# Altium footprint library Package_DFN_QFN.PcbLib: 735 footprints (part 8 of 46)
Each footprint in its own frame and in the unit in brackets; x right, y up, seen from the top. Pads: shape width x height; smd on the part's side, far side on the other; paste and mask are expansions set on the pad; w line width, h text height; cw(c..) or ccw(c..) is an arc to the next point about the centre after c.
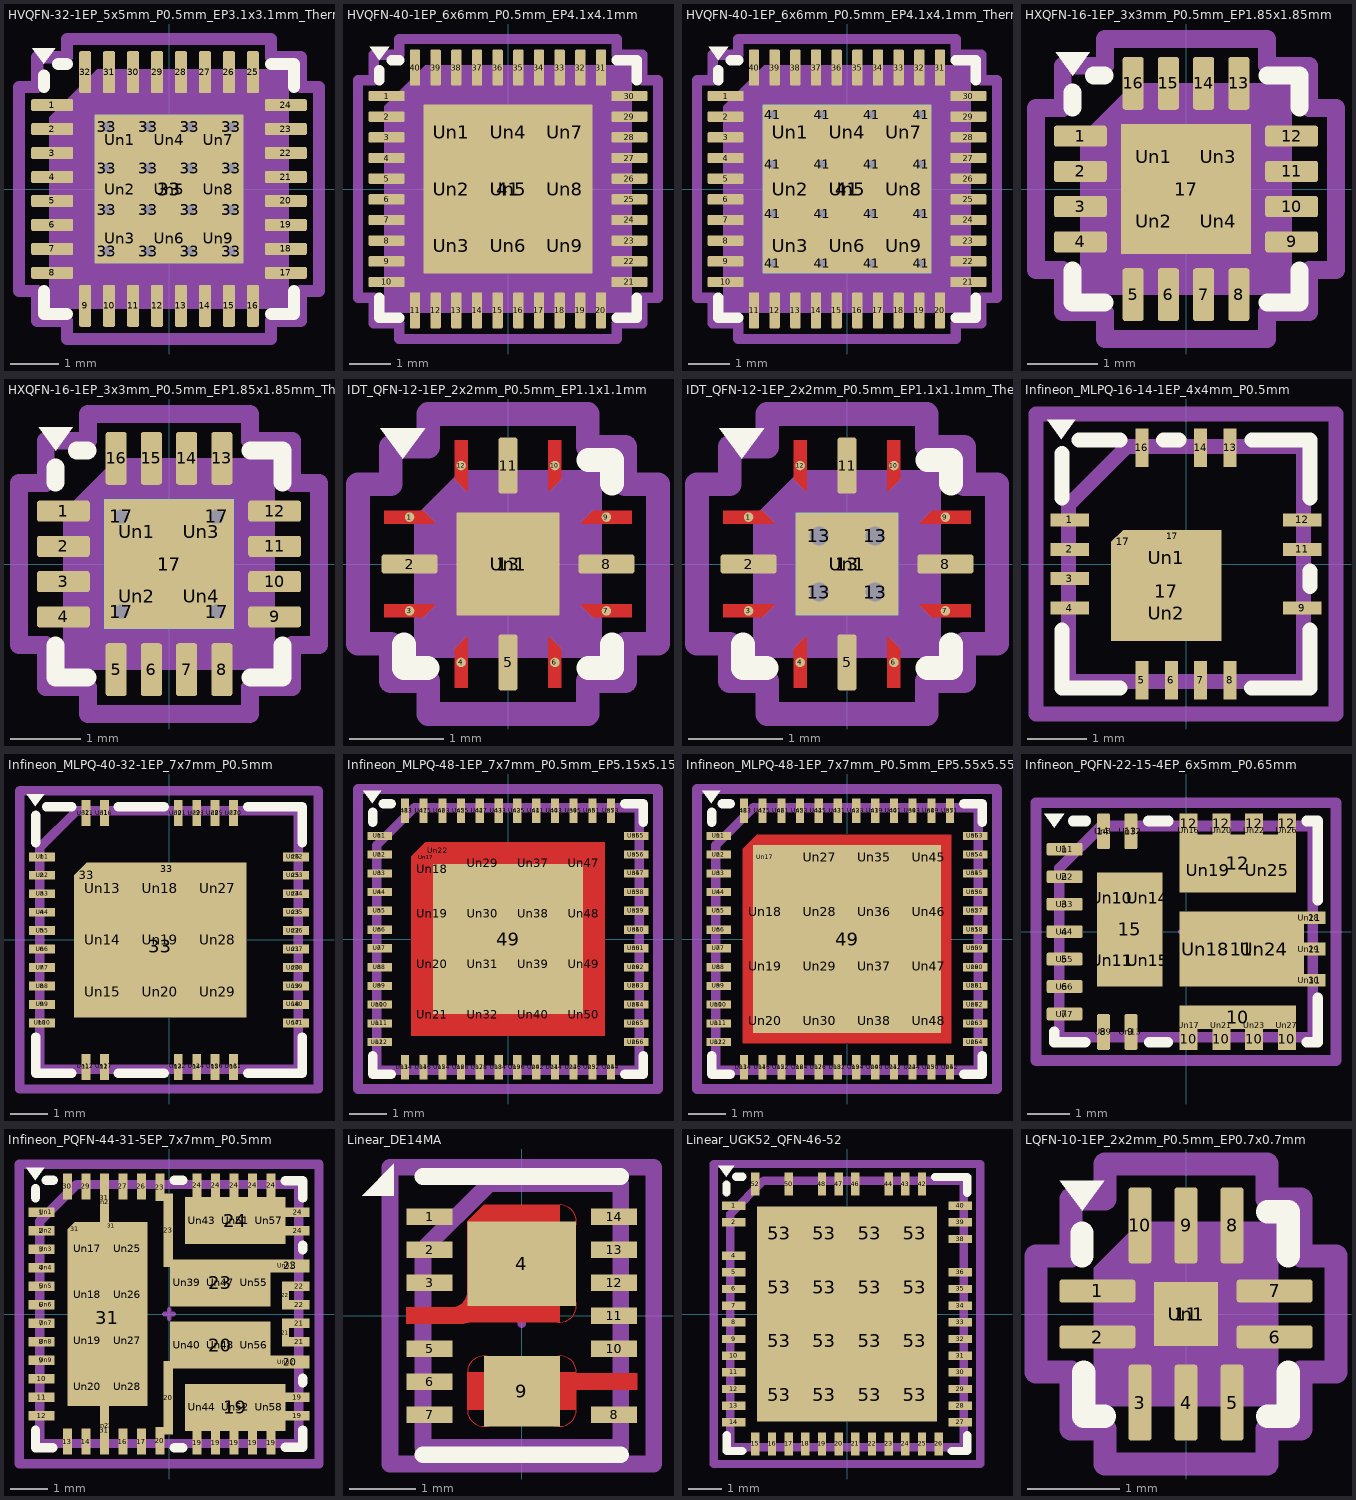
[diagram p7: the footprints below, top view; thin cyan lines are the x and y axes]

## HVQFN-32-1EP_5x5mm_P0.5mm_EP3.1x3.1mm_ThermalVias [mm] "HVQFN-32-1EP_5x5mm_P0.5mm_EP3.1x3.1mm_ThermalVias"
pads (59):
  rrect25% 0.875x0.25 smd: 1(-2.438,1.75) 2(-2.438,1.25) 3(-2.438,0.75) 4(-2.438,0.25) 5(-2.438,-0.25) 6(-2.438,-0.75) 7(-2.438,-1.25) 8(-2.438,-1.75) 17(2.438,-1.75) 18(2.438,-1.25) 19(2.438,-0.75) 20(2.438,-0.25) 21(2.438,0.25) 22(2.438,0.75) 23(2.438,1.25) 24(2.438,1.75)
  rrect25% 0.25x0.875 smd: 9(-1.75,-2.438) 10(-1.25,-2.438) 11(-0.75,-2.438) 12(-0.25,-2.438) 13(0.25,-2.438) 14(0.75,-2.438) 15(1.25,-2.438) 16(1.75,-2.438) 25(1.75,2.438) 26(1.25,2.438) 27(0.75,2.438) 28(0.25,2.438) 29(-0.25,2.438) 30(-0.75,2.438) 31(-1.25,2.438) 32(-1.75,2.438)
  round 0.5 hole 0.2: 33(-1.3,-1.3) 33(-1.3,-0.433) 33(-1.3,0.433) 33(-1.3,1.3) 33(-0.433,-1.3) 33(-0.433,-0.433) 33(-0.433,0.433) 33(-0.433,1.3) 33(0.433,-1.3) 33(0.433,-0.433) 33(0.433,0.433) 33(0.433,1.3) 33(1.3,-1.3) 33(1.3,-0.433) 33(1.3,0.433) 33(1.3,1.3)
  rect 3.1x3.1 smd: 33(0,0)
  rect 3.1x3.1 smd far side: 33(0,0)
  rrect25% 0.77x0.77 on Top Paste: Un1(-1.03,1.03) Un2(-1.03,0) Un3(-1.03,-1.03) Un4(0,1.03) Un5(0,0) Un6(0,-1.03) Un7(1.03,1.03) Un8(1.03,0) Un9(1.03,-1.03)
F.SilkS:
  region: -2.61,2.61 -2.85,2.94 -2.37,2.94
  lines w0.254: -2.61,-2.135 -2.61,-2.61 -2.135,-2.61 ; -2.61,2.135 -2.61,2.37 ; -2.31,2.61 -2.135,2.61 ; 2.135,-2.61 2.61,-2.61 2.61,-2.135 ; 2.135,2.61 2.61,2.61 2.61,2.135
Top Component Center:
  lines w0.127: -0.127,0 0.127,0 -0.127,0 ; 0,-0.127 0,0.127 0,-0.127
Top Assembly:
  region: 2.5,-2.5 -2.5,-2.5 -2.5,1.5 -1.5,2.5 2.5,2.5
Top Courtyard:
  lines w0.254: -3.13,-2.13 -3.13,2.13 -2.75,2.13 -2.75,2.75 -2.13,2.75 -2.13,3.13 2.13,3.13 2.13,2.75 2.75,2.75 2.75,2.13 3.13,2.13 3.13,-2.13 2.75,-2.13 2.75,-2.75 2.13,-2.75 2.13,-3.13 -2.13,-3.13 -2.13,-2.75 -2.75,-2.75 -2.75,-2.13 -3.13,-2.13
Top Designator:
  text ".Designator" at -3.43,-0.344 h1.52

## HVQFN-40-1EP_6x6mm_P0.5mm_EP4.1x4.1mm [mm] "HVQFN-40-1EP_6x6mm_P0.5mm_EP4.1x4.1mm"
pads (50):
  rrect25% 0.875x0.25 smd: 1(-2.937,2.25) 2(-2.937,1.75) 3(-2.937,1.25) 4(-2.937,0.75) 5(-2.937,0.25) 6(-2.937,-0.25) 7(-2.937,-0.75) 8(-2.937,-1.25) 9(-2.937,-1.75) 10(-2.937,-2.25) 21(2.937,-2.25) 22(2.937,-1.75) 23(2.937,-1.25) 24(2.937,-0.75) 25(2.937,-0.25) 26(2.937,0.25) 27(2.937,0.75) 28(2.937,1.25) 29(2.937,1.75) 30(2.937,2.25)
  rrect25% 0.25x0.875 smd: 11(-2.25,-2.937) 12(-1.75,-2.937) 13(-1.25,-2.937) 14(-0.75,-2.937) 15(-0.25,-2.937) 16(0.25,-2.937) 17(0.75,-2.937) 18(1.25,-2.937) 19(1.75,-2.937) 20(2.25,-2.937) 31(2.25,2.937) 32(1.75,2.937) 33(1.25,2.937) 34(0.75,2.937) 35(0.25,2.937) 36(-0.25,2.937) 37(-0.75,2.937) 38(-1.25,2.937) 39(-1.75,2.937) 40(-2.25,2.937)
  rect 4.1x4.1 smd: 41(0,0)
  rrect23% 1.1x1.1 on Top Paste: Un1(-1.37,1.37) Un2(-1.37,0) Un3(-1.37,-1.37) Un4(0,1.37) Un5(0,0) Un6(0,-1.37) Un7(1.37,1.37) Un8(1.37,0) Un9(1.37,-1.37)
F.SilkS:
  region: -3.11,3.11 -3.35,3.44 -2.87,3.44
  lines w0.254: -3.11,-2.635 -3.11,-3.11 -2.635,-3.11 ; -3.11,2.635 -3.11,2.87 ; -2.81,3.11 -2.635,3.11 ; 2.635,-3.11 3.11,-3.11 3.11,-2.635 ; 2.635,3.11 3.11,3.11 3.11,2.635
Top Component Center:
  lines w0.127: -0.127,0 0.127,0 -0.127,0 ; 0,-0.127 0,0.127 0,-0.127
Top Assembly:
  region: 3,-3 -3,-3 -3,2 -2,3 3,3
Top Courtyard:
  lines w0.254: -3.63,-2.63 -3.63,2.63 -3.25,2.63 -3.25,3.25 -2.63,3.25 -2.63,3.63 2.63,3.63 2.63,3.25 3.25,3.25 3.25,2.63 3.63,2.63 3.63,-2.63 3.25,-2.63 3.25,-3.25 2.63,-3.25 2.63,-3.63 -2.63,-3.63 -2.63,-3.25 -3.25,-3.25 -3.25,-2.63 -3.63,-2.63
Top Designator:
  text ".Designator" at -3.43,-0.344 h1.52

## HVQFN-40-1EP_6x6mm_P0.5mm_EP4.1x4.1mm_ThermalVias [mm] "HVQFN-40-1EP_6x6mm_P0.5mm_EP4.1x4.1mm_ThermalVias"
pads (67):
  rrect25% 0.875x0.25 smd: 1(-2.937,2.25) 2(-2.937,1.75) 3(-2.937,1.25) 4(-2.937,0.75) 5(-2.937,0.25) 6(-2.937,-0.25) 7(-2.937,-0.75) 8(-2.937,-1.25) 9(-2.937,-1.75) 10(-2.937,-2.25) 21(2.937,-2.25) 22(2.937,-1.75) 23(2.937,-1.25) 24(2.937,-0.75) 25(2.937,-0.25) 26(2.937,0.25) 27(2.937,0.75) 28(2.937,1.25) 29(2.937,1.75) 30(2.937,2.25)
  rrect25% 0.25x0.875 smd: 11(-2.25,-2.937) 12(-1.75,-2.937) 13(-1.25,-2.937) 14(-0.75,-2.937) 15(-0.25,-2.937) 16(0.25,-2.937) 17(0.75,-2.937) 18(1.25,-2.937) 19(1.75,-2.937) 20(2.25,-2.937) 31(2.25,2.937) 32(1.75,2.937) 33(1.25,2.937) 34(0.75,2.937) 35(0.25,2.937) 36(-0.25,2.937) 37(-0.75,2.937) 38(-1.25,2.937) 39(-1.75,2.937) 40(-2.25,2.937)
  round 0.5 hole 0.2: 41(-1.8,-1.8) 41(-1.8,-0.6) 41(-1.8,0.6) 41(-1.8,1.8) 41(-0.6,-1.8) 41(-0.6,-0.6) 41(-0.6,0.6) 41(-0.6,1.8) 41(0.6,-1.8) 41(0.6,-0.6) 41(0.6,0.6) 41(0.6,1.8) 41(1.8,-1.8) 41(1.8,-0.6) 41(1.8,0.6) 41(1.8,1.8)
  rect 4.1x4.1 smd: 41(0,0)
  rect 4.1x4.1 smd far side: 41(0,0)
  rrect24% 1.06x1.06 on Top Paste: Un1(-1.37,1.37) Un2(-1.37,0) Un3(-1.37,-1.37) Un4(0,1.37) Un5(0,0) Un6(0,-1.37) Un7(1.37,1.37) Un8(1.37,0) Un9(1.37,-1.37)
F.SilkS:
  region: -3.11,3.11 -3.35,3.44 -2.87,3.44
  lines w0.254: -3.11,-2.635 -3.11,-3.11 -2.635,-3.11 ; -3.11,2.635 -3.11,2.87 ; -2.81,3.11 -2.635,3.11 ; 2.635,-3.11 3.11,-3.11 3.11,-2.635 ; 2.635,3.11 3.11,3.11 3.11,2.635
Top Component Center:
  lines w0.127: -0.127,0 0.127,0 -0.127,0 ; 0,-0.127 0,0.127 0,-0.127
Top Assembly:
  region: 3,-3 -3,-3 -3,2 -2,3 3,3
Top Courtyard:
  lines w0.254: -3.63,-2.63 -3.25,-2.63 -3.25,-3.25 -2.63,-3.25 -2.63,-3.63 2.63,-3.63 2.63,-3.25 3.25,-3.25 3.25,-2.63 3.63,-2.63 3.63,2.63 3.25,2.63 3.25,3.25 2.63,3.25 2.63,3.63 -2.63,3.63 -2.63,3.25 -3.25,3.25 -3.25,2.63 -3.63,2.63 -3.63,-2.63
Top Designator:
  text ".Designator" at -3.43,-0.344 h1.52

## HXQFN-16-1EP_3x3mm_P0.5mm_EP1.85x1.85mm [mm] "HXQFN-16-1EP_3x3mm_P0.5mm_EP1.85x1.85mm"
pads (21):
  rrect25% 0.75x0.3 smd: 1(-1.5,0.75) 2(-1.5,0.25) 3(-1.5,-0.25) 4(-1.5,-0.75) 9(1.5,-0.75) 10(1.5,-0.25) 11(1.5,0.25) 12(1.5,0.75)
  rrect25% 0.3x0.75 smd: 5(-0.75,-1.5) 6(-0.25,-1.5) 7(0.25,-1.5) 8(0.75,-1.5) 13(0.75,1.5) 14(0.25,1.5) 15(-0.25,1.5) 16(-0.75,1.5)
  rect 1.85x1.85 smd: 17(0,0)
  rrect25% 0.75x0.75 on Top Paste: Un1(-0.46,0.46) Un2(-0.46,-0.46) Un3(0.46,0.46) Un4(0.46,-0.46)
F.SilkS:
  region: -1.61,1.61 -1.85,1.94 -1.37,1.94
  lines w0.254: -1.61,-1.16 -1.61,-1.61 -1.16,-1.61 ; -1.61,1.16 -1.61,1.37 ; -1.31,1.61 -1.16,1.61 ; 1.16,-1.61 1.61,-1.61 1.61,-1.16 ; 1.16,1.61 1.61,1.61 1.61,1.16
Top Component Center:
  lines w0.127: -0.127,0 0.127,0 -0.127,0 ; 0,-0.127 0,0.127 0,-0.127
Top Assembly:
  region: 1.5,-1.5 -1.5,-1.5 -1.5,0.75 -0.75,1.5 1.5,1.5
Top Courtyard:
  lines w0.254: -2.13,-1.15 -1.75,-1.15 -1.75,-1.75 -1.15,-1.75 -1.15,-2.13 1.15,-2.13 1.15,-1.75 1.75,-1.75 1.75,-1.15 2.13,-1.15 2.13,1.15 1.75,1.15 1.75,1.75 1.15,1.75 1.15,2.13 -1.15,2.13 -1.15,1.75 -1.75,1.75 -1.75,1.15 -2.13,1.15 -2.13,-1.15
Top Designator:
  text ".Designator" at -3.43,-0.344 h1.52
3D body "HXQFN-16-1EP_3x3mm_P0.5mm_EP1.85x1.85mm.step": height 0.5, standoff 0, extent -1.5,-1.5 1.5,1.5

## HXQFN-16-1EP_3x3mm_P0.5mm_EP1.85x1.85mm_ThermalVias [mm] "HXQFN-16-1EP_3x3mm_P0.5mm_EP1.85x1.85mm_ThermalVias"
pads (26):
  rrect25% 0.75x0.3 smd: 1(-1.5,0.75) 2(-1.5,0.25) 3(-1.5,-0.25) 4(-1.5,-0.75) 9(1.5,-0.75) 10(1.5,-0.25) 11(1.5,0.25) 12(1.5,0.75)
  rrect25% 0.3x0.75 smd: 5(-0.75,-1.5) 6(-0.25,-1.5) 7(0.25,-1.5) 8(0.75,-1.5) 13(0.75,1.5) 14(0.25,1.5) 15(-0.25,1.5) 16(-0.75,1.5)
  round 0.5 hole 0.2: 17(-0.675,-0.675) 17(-0.675,0.675) 17(0.675,-0.675) 17(0.675,0.675)
  rect 1.85x1.85 smd: 17(0,0)
  rect 1.85x1.85 smd far side: 17(0,0)
  rrect25% 0.75x0.75 on Top Paste: Un1(-0.46,0.46) Un2(-0.46,-0.46) Un3(0.46,0.46) Un4(0.46,-0.46)
F.SilkS:
  region: -1.61,1.61 -1.85,1.94 -1.37,1.94
  lines w0.254: -1.61,-1.16 -1.61,-1.61 -1.16,-1.61 ; -1.61,1.16 -1.61,1.37 ; -1.31,1.61 -1.16,1.61 ; 1.16,-1.61 1.61,-1.61 1.61,-1.16 ; 1.16,1.61 1.61,1.61 1.61,1.16
Top Component Center:
  lines w0.127: -0.127,0 0.127,0 -0.127,0 ; 0,-0.127 0,0.127 0,-0.127
Top Assembly:
  region: 1.5,-1.5 -1.5,-1.5 -1.5,0.75 -0.75,1.5 1.5,1.5
Top Courtyard:
  lines w0.254: -2.13,-1.15 -2.13,1.15 -1.75,1.15 -1.75,1.75 -1.15,1.75 -1.15,2.13 1.15,2.13 1.15,1.75 1.75,1.75 1.75,1.15 2.13,1.15 2.13,-1.15 1.75,-1.15 1.75,-1.75 1.15,-1.75 1.15,-2.13 -1.15,-2.13 -1.15,-1.75 -1.75,-1.75 -1.75,-1.15 -2.13,-1.15
Top Designator:
  text ".Designator" at -3.43,-0.344 h1.52
3D body "HXQFN-16-1EP_3x3mm_P0.5mm_EP1.85x1.85mm.step": height 0.5, standoff 0, extent -1.5,-1.5 1.5,1.5

## IDT_QFN-12-1EP_2x2mm_P0.5mm_EP1.1x1.1mm [mm] "IDT_QFN-12-1EP_2x2mm_P0.5mm_EP1.1x1.1mm"
pads (14):
  round 0.101 smd: 1(-1.05,0.5) 3(-1.05,-0.5) 4(-0.5,-1.05) 6(0.5,-1.05) 7(1.05,-0.5) 9(1.05,0.5) 10(0.5,1.05) 12(-0.5,1.05)
  rrect25% 0.6x0.2 smd: 2(-1.05,0) 8(1.05,0)
  rrect25% 0.2x0.6 smd: 5(0,-1.05) 11(0,1.05)
  rect 1.1x1.1 smd: 13(0,0)
  rrect25% 0.89x0.89 on Top Paste: Un1(0,0)
F.Cu:
  region: -0.78,0.448 -0.78,0.43 -1.32,0.43 -1.32,0.57 -0.902,0.57
  region: -0.78,-0.448 -0.902,-0.57 -1.32,-0.57 -1.32,-0.43 -0.78,-0.43
  region: -0.43,-1.32 -0.57,-1.32 -0.57,-0.902 -0.448,-0.78 -0.43,-0.78
  region: 0.57,-0.902 0.57,-1.32 0.43,-1.32 0.43,-0.78 0.448,-0.78
  region: 1.32,-0.57 0.902,-0.57 0.78,-0.448 0.78,-0.43 1.32,-0.43
  region: 1.32,0.43 0.78,0.43 0.78,0.448 0.902,0.57 1.32,0.57
  region: 0.57,0.902 0.448,0.78 0.43,0.78 0.43,1.32 0.57,1.32
  region: -0.43,0.78 -0.448,0.78 -0.57,0.902 -0.57,1.32 -0.43,1.32
F.SilkS:
  region: -1.12,1.12 -1.36,1.45 -0.88,1.45
  lines w0.254: -1.11,-0.86 -1.11,-1.11 -0.86,-1.11 ; 0.86,-1.11 1.11,-1.11 1.11,-0.86 ; 0.86,1.11 1.11,1.11 1.11,0.86
F.Paste:
  region: -0.78,0.448 -0.78,0.43 -1.32,0.43 -1.32,0.57 -0.902,0.57
  region: -0.78,-0.448 -0.902,-0.57 -1.32,-0.57 -1.32,-0.43 -0.78,-0.43
  region: -0.43,-1.32 -0.57,-1.32 -0.57,-0.902 -0.448,-0.78 -0.43,-0.78
  region: 0.57,-0.902 0.57,-1.32 0.43,-1.32 0.43,-0.78 0.448,-0.78
  region: 1.32,-0.57 0.902,-0.57 0.78,-0.448 0.78,-0.43 1.32,-0.43
  region: 1.32,0.43 0.78,0.43 0.78,0.448 0.902,0.57 1.32,0.57
  region: 0.57,0.902 0.448,0.78 0.43,0.78 0.43,1.32 0.57,1.32
  region: -0.43,0.78 -0.448,0.78 -0.57,0.902 -0.57,1.32 -0.43,1.32
F.Mask:
  region: -0.78,0.448 -0.78,0.43 -1.32,0.43 -1.32,0.57 -0.902,0.57
  region: -0.78,-0.448 -0.902,-0.57 -1.32,-0.57 -1.32,-0.43 -0.78,-0.43
  region: -0.43,-1.32 -0.57,-1.32 -0.57,-0.902 -0.448,-0.78 -0.43,-0.78
  region: 0.57,-0.902 0.57,-1.32 0.43,-1.32 0.43,-0.78 0.448,-0.78
  region: 1.32,-0.57 0.902,-0.57 0.78,-0.448 0.78,-0.43 1.32,-0.43
  region: 1.32,0.43 0.78,0.43 0.78,0.448 0.902,0.57 1.32,0.57
  region: 0.57,0.902 0.448,0.78 0.43,0.78 0.43,1.32 0.57,1.32
  region: -0.43,0.78 -0.448,0.78 -0.57,0.902 -0.57,1.32 -0.43,1.32
Top Component Center:
  lines w0.127: -0.127,0 0.127,0 -0.127,0 ; 0,-0.127 0,0.127 0,-0.127
Top Assembly:
  region: 1,-1 -1,-1 -1,0.5 -0.5,1 1,1
Top Courtyard:
  lines w0.254: -1.6,-0.85 -1.6,0.85 -1.25,0.85 -1.25,1.25 -0.85,1.25 -0.85,1.6 0.85,1.6 0.85,1.25 1.25,1.25 1.25,0.85 1.6,0.85 1.6,-0.85 1.25,-0.85 1.25,-1.25 0.85,-1.25 0.85,-1.6 -0.85,-1.6 -0.85,-1.25 -1.25,-1.25 -1.25,-0.85 -1.6,-0.85
Top Designator:
  text ".Designator" at -3.43,-0.344 h1.52

## IDT_QFN-12-1EP_2x2mm_P0.5mm_EP1.1x1.1mm_ThermalVias [mm] "IDT_QFN-12-1EP_2x2mm_P0.5mm_EP1.1x1.1mm_ThermalVias"
pads (19):
  round 0.101 smd: 1(-1.05,0.5) 3(-1.05,-0.5) 4(-0.5,-1.05) 6(0.5,-1.05) 7(1.05,-0.5) 9(1.05,0.5) 10(0.5,1.05) 12(-0.5,1.05)
  rrect25% 0.6x0.2 smd: 2(-1.05,0) 8(1.05,0)
  rrect25% 0.2x0.6 smd: 5(0,-1.05) 11(0,1.05)
  round 0.5 hole 0.2: 13(-0.3,-0.3) 13(-0.3,0.3) 13(0.3,-0.3) 13(0.3,0.3)
  rect 1.1x1.1 smd: 13(0,0)
  rect 1.1x1.1 smd far side: 13(0,0)
  rrect25% 0.92x0.92 on Top Paste: Un1(0,0)
F.Cu:
  region: -0.43,0.78 -0.448,0.78 -0.57,0.902 -0.57,1.32 -0.43,1.32
  region: 0.57,0.902 0.448,0.78 0.43,0.78 0.43,1.32 0.57,1.32
  region: 1.32,0.43 0.78,0.43 0.78,0.448 0.902,0.57 1.32,0.57
  region: 1.32,-0.57 0.902,-0.57 0.78,-0.448 0.78,-0.43 1.32,-0.43
  region: 0.57,-0.902 0.57,-1.32 0.43,-1.32 0.43,-0.78 0.448,-0.78
  region: -0.43,-1.32 -0.57,-1.32 -0.57,-0.902 -0.448,-0.78 -0.43,-0.78
  region: -0.78,-0.448 -0.902,-0.57 -1.32,-0.57 -1.32,-0.43 -0.78,-0.43
  region: -0.78,0.448 -0.78,0.43 -1.32,0.43 -1.32,0.57 -0.902,0.57
F.SilkS:
  region: -1.12,1.12 -1.36,1.45 -0.88,1.45
  lines w0.254: -1.11,-0.86 -1.11,-1.11 -0.86,-1.11 ; 0.86,-1.11 1.11,-1.11 1.11,-0.86 ; 0.86,1.11 1.11,1.11 1.11,0.86
F.Paste:
  region: -0.43,0.78 -0.448,0.78 -0.57,0.902 -0.57,1.32 -0.43,1.32
  region: 0.57,0.902 0.448,0.78 0.43,0.78 0.43,1.32 0.57,1.32
  region: 1.32,0.43 0.78,0.43 0.78,0.448 0.902,0.57 1.32,0.57
  region: 1.32,-0.57 0.902,-0.57 0.78,-0.448 0.78,-0.43 1.32,-0.43
  region: 0.57,-0.902 0.57,-1.32 0.43,-1.32 0.43,-0.78 0.448,-0.78
  region: -0.43,-1.32 -0.57,-1.32 -0.57,-0.902 -0.448,-0.78 -0.43,-0.78
  region: -0.78,-0.448 -0.902,-0.57 -1.32,-0.57 -1.32,-0.43 -0.78,-0.43
  region: -0.78,0.448 -0.78,0.43 -1.32,0.43 -1.32,0.57 -0.902,0.57
F.Mask:
  region: -0.43,0.78 -0.448,0.78 -0.57,0.902 -0.57,1.32 -0.43,1.32
  region: 0.57,0.902 0.448,0.78 0.43,0.78 0.43,1.32 0.57,1.32
  region: 1.32,0.43 0.78,0.43 0.78,0.448 0.902,0.57 1.32,0.57
  region: 1.32,-0.57 0.902,-0.57 0.78,-0.448 0.78,-0.43 1.32,-0.43
  region: 0.57,-0.902 0.57,-1.32 0.43,-1.32 0.43,-0.78 0.448,-0.78
  region: -0.43,-1.32 -0.57,-1.32 -0.57,-0.902 -0.448,-0.78 -0.43,-0.78
  region: -0.78,-0.448 -0.902,-0.57 -1.32,-0.57 -1.32,-0.43 -0.78,-0.43
  region: -0.78,0.448 -0.78,0.43 -1.32,0.43 -1.32,0.57 -0.902,0.57
Top Component Center:
  lines w0.127: -0.127,0 0.127,0 -0.127,0 ; 0,-0.127 0,0.127 0,-0.127
Top Assembly:
  region: 1,-1 -1,-1 -1,0.5 -0.5,1 1,1
Top Courtyard:
  lines w0.254: -1.6,-0.85 -1.25,-0.85 -1.25,-1.25 -0.85,-1.25 -0.85,-1.6 0.85,-1.6 0.85,-1.25 1.25,-1.25 1.25,-0.85 1.6,-0.85 1.6,0.85 1.25,0.85 1.25,1.25 0.85,1.25 0.85,1.6 -0.85,1.6 -0.85,1.25 -1.25,1.25 -1.25,0.85 -1.6,0.85 -1.6,-0.85
Top Designator:
  text ".Designator" at -2.251,-0.226 h1

## Infineon_MLPQ-16-14-1EP_4x4mm_P0.5mm [mm] "Infineon_MLPQ-16-14-1EP_4x4mm_P0.5mm"
pads (19):
  rect 0.65x0.22 smd: 1(-1.975,0.75) 2(-1.975,0.25) 3(-1.975,-0.25) 4(-1.975,-0.75) 9(1.975,-0.75) 11(1.975,0.25) 12(1.975,0.75)
  rect 0.22x0.65 smd: 5(-0.75,-1.975) 6(-0.25,-1.975) 7(0.25,-1.975) 8(0.75,-1.975) 13(0.75,1.975) 14(0.25,1.975) 16(-0.75,1.975)
  rect 0.283x0.283 smd rot 45: 17(-1.075,0.375)
  rect 1.88x1.68 smd: 17(-0.335,-0.465)
  rect 1.68x0.2 smd: 17(-0.235,0.475)
  rect 1.5x0.8 on Top Paste: Un1(-0.335,0.105) Un2(-0.335,-0.835)
F.SilkS:
  region: -2.12,2.12 -2.36,2.45 -1.88,2.45
  lines w0.254: -2.11,-1.12 -2.11,-2.11 -1.12,-2.11 ; -2.11,1.12 -2.11,1.88 ; -1.82,2.11 -1.12,2.11 ; -0.38,2.11 -0.12,2.11 ; 1.115,-2.11 2.105,-2.11 ; 1.12,2.11 2.11,2.11 2.11,1.12 ; 2.11,-2.1 2.11,-1.12 ; 2.11,-0.38 2.11,-0.12
Top Component Center:
  lines w0.127: -0.127,0 0.127,0 -0.127,0 ; 0,-0.127 0,0.127 0,-0.127
Top Assembly:
  lines w0.254: -2,-2 2,-2 2,2 -1,2 -2,1 -2,-2
Top Courtyard:
  lines w0.254: -2.55,-2.55 2.55,-2.55 2.55,2.55 -2.55,2.55 -2.55,-2.55
Top Designator:
  text ".Designator" at -3.43,-0.344 h1.52
3D body "Infineon_MLPQ-16-14-1EP_4x4mm_P0.5mm.step": height 0.78, standoff 0, extent -2,-2 2,2

## Infineon_MLPQ-40-32-1EP_7x7mm_P0.5mm [mm] "Infineon_MLPQ-40-32-1EP_7x7mm_P0.5mm"
pads (76):
  rect 0.7x0.24 smd: 1(-3.44,2.25) 2(-3.44,1.75) 3(-3.44,1.25) 4(-3.44,0.75) 5(-3.44,0.25) 6(-3.44,-0.25) 7(-3.44,-0.75) 8(-3.44,-1.25) 9(-3.44,-1.75) 10(-3.44,-2.25) 17(3.44,-2.25) 18(3.44,-1.75) 19(3.44,-1.25) 20(3.44,-0.75) 21(3.44,-0.25) 22(3.44,0.25) 23(3.44,0.75) 24(3.44,1.25) 25(3.44,1.75) 26(3.44,2.25)
  rect 0.24x0.7 smd: 11(-2.25,-3.44) 12(-1.75,-3.44) 13(0.25,-3.44) 14(0.75,-3.44) 15(1.25,-3.44) 16(1.75,-3.44) 27(1.75,3.44) 28(1.25,3.44) 29(0.75,3.44) 30(0.25,3.44) 31(-1.75,3.44) 32(-2.25,3.44)
  rect 0.495x0.495 smd rot 45: 33(-2.225,1.75)
  rect 4.675x3.85 smd: 33(-0.238,-0.175)
  rect 4.325x0.35 smd: 33(-0.062,1.925)
  rect 0.65x0.22 on Top Paste: Un1(-3.425,2.25) Un2(-3.425,1.75) Un3(-3.425,1.25) Un4(-3.425,0.75) Un5(-3.425,0.25) Un6(-3.425,-0.25) Un7(-3.425,-0.75) Un8(-3.425,-1.25) Un9(-3.425,-1.75) Un10(-3.425,-2.25) Un32(3.425,2.25) Un33(3.425,1.75) Un34(3.425,1.25) Un35(3.425,0.75) Un36(3.425,0.25) Un37(3.425,-0.25) Un38(3.425,-0.75) Un39(3.425,-1.25) Un40(3.425,-1.75) Un41(3.425,-2.25)
  rect 0.22x0.65 on Top Paste: Un11(-2.25,3.425) Un12(-2.25,-3.425) Un16(-1.75,3.425) Un17(-1.75,-3.425) Un21(0.25,3.425) Un22(0.25,-3.425) Un23(0.75,3.425) Un24(0.75,-3.425) Un25(1.25,3.425) Un26(1.25,-3.425) Un30(1.75,3.425) Un31(1.75,-3.425)
  rect 1.2x1.1 on Top Paste: Un13(-1.796,1.4) Un14(-1.796,0) Un15(-1.796,-1.4) Un18(-0.238,1.4) Un19(-0.238,0) Un20(-0.238,-1.4) Un27(1.321,1.4) Un28(1.321,0) Un29(1.321,-1.4)
F.SilkS:
  region: -3.62,3.62 -3.86,3.95 -3.38,3.95
  lines w0.254: -3.61,-2.63 -3.61,-3.61 -2.63,-3.61 ; -3.61,2.63 -3.61,3.38 ; -3.32,3.61 -2.63,3.61 ; -1.37,-3.61 -0.13,-3.61 ; -1.37,3.61 -0.13,3.61 ; 2.13,-3.61 3.61,-3.61 3.61,-2.63 ; 2.13,3.61 3.61,3.61 3.61,2.63
Top Component Center:
  lines w0.127: -0.127,0 0.127,0 -0.127,0 ; 0,-0.127 0,0.127 0,-0.127
Top Assembly:
  lines w0.254: -3.5,-3.5 -3.5,2.5 -2.5,3.5 3.5,3.5 3.5,-3.5 -3.5,-3.5
Top Courtyard:
  lines w0.254: -4.04,-4.04 -4.04,4.04 4.04,4.04 4.04,-4.04 -4.04,-4.04
Top Designator:
  text ".Designator" at -3.43,-0.344 h1.52

## Infineon_MLPQ-48-1EP_7x7mm_P0.5mm_EP5.15x5.15mm [mm] "Infineon_MLPQ-48-1EP_7x7mm_P0.5mm_EP5.15x5.15mm"
pads (115):
  rect 0.65x0.22 smd: 1(-3.425,2.75) 2(-3.425,2.25) 3(-3.425,1.75) 4(-3.425,1.25) 5(-3.425,0.75) 6(-3.425,0.25) 7(-3.425,-0.25) 8(-3.425,-0.75) 9(-3.425,-1.25) 10(-3.425,-1.75) 11(-3.425,-2.25) 12(-3.425,-2.75) 25(3.425,-2.75) 26(3.425,-2.25) 27(3.425,-1.75) 28(3.425,-1.25) 29(3.425,-0.75) 30(3.425,-0.25) 31(3.425,0.25) 32(3.425,0.75) 33(3.425,1.25) 34(3.425,1.75) 35(3.425,2.25) 36(3.425,2.75)
  rect 0.22x0.65 smd: 13(-2.75,-3.425) 14(-2.25,-3.425) 15(-1.75,-3.425) 16(-1.25,-3.425) 17(-0.75,-3.425) 18(-0.25,-3.425) 19(0.25,-3.425) 20(0.75,-3.425) 21(1.25,-3.425) 22(1.75,-3.425) 23(2.25,-3.425) 24(2.75,-3.425) 37(2.75,3.425) 38(2.25,3.425) 39(1.75,3.425) 40(1.25,3.425) 41(0.75,3.425) 42(0.25,3.425) 43(-0.25,3.425) 44(-0.75,3.425) 45(-1.25,3.425) 46(-1.75,3.425) 47(-2.25,3.425) 48(-2.75,3.425)
  rect 4x4 smd: 49(0,0)
  rect 0.55x0.22 on Top Paste: Un1(-3.425,2.75) Un2(-3.425,2.25) Un3(-3.425,1.75) Un4(-3.425,1.25) Un5(-3.425,0.75) Un6(-3.425,0.25) Un7(-3.425,-0.25) Un8(-3.425,-0.75) Un9(-3.425,-1.25) Un10(-3.425,-1.75) Un11(-3.425,-2.25) Un12(-3.425,-2.75) Un55(3.425,2.75) Un56(3.425,2.25) Un57(3.425,1.75) Un58(3.425,1.25) Un59(3.425,0.75) Un60(3.425,0.25) Un61(3.425,-0.25) Un62(3.425,-0.75) Un63(3.425,-1.25) Un64(3.425,-1.75) Un65(3.425,-2.25) Un66(3.425,-2.75)
  rect 0.22x0.55 on Top Paste: Un13(-2.75,3.425) Un14(-2.75,-3.425) Un15(-2.25,3.425) Un16(-2.25,-3.425) Un23(-1.75,3.425) Un24(-1.75,-3.425) Un25(-1.25,3.425) Un26(-1.25,-3.425) Un27(-0.75,3.425) Un28(-0.75,-3.425) Un33(-0.25,3.425) Un34(-0.25,-3.425) Un35(0.25,3.425) Un36(0.25,-3.425) Un41(0.75,3.425) Un42(0.75,-3.425) Un43(1.25,3.425) Un44(1.25,-3.425) Un45(1.75,3.425) Un46(1.75,-3.425) Un51(2.25,3.425) Un52(2.25,-3.425) Un53(2.75,3.425) Un54(2.75,-3.425)
  rect 0.479x0.479 on Top Paste rot 45: Un17(-2.186,2.186)
  rect 1x0.661 on Top Paste: Un18(-2.025,1.856)
  rect 1x1 on Top Paste: Un19(-2.025,0.675) Un20(-2.025,-0.675) Un21(-2.025,-2.025) Un29(-0.675,2.025) Un30(-0.675,0.675) Un31(-0.675,-0.675) Un32(-0.675,-2.025) Un37(0.675,2.025) Un38(0.675,0.675) Un39(0.675,-0.675) Un40(0.675,-2.025) Un47(2.025,2.025) Un48(2.025,0.675) Un49(2.025,-0.675) Un50(2.025,-2.025)
  rect 0.661x0.339 on Top Paste: Un22(-1.856,2.355)
F.Cu:
  region: 2.575,-2.575 -2.575,-2.575 -2.575,2.207 -2.207,2.575 2.575,2.575
F.SilkS:
  region: -3.62,3.62 -3.86,3.95 -3.38,3.95
  lines w0.254: -3.61,-3.12 -3.61,-3.61 -3.12,-3.61 ; -3.61,3.12 -3.61,3.38 ; -3.32,3.61 -3.12,3.61 ; 3.115,3.61 3.605,3.61 3.605,3.12 ; 3.12,-3.605 3.61,-3.605 3.61,-3.12
F.Mask:
  region: 2.575,-2.575 -2.575,-2.575 -2.575,2.207 -2.207,2.575 2.575,2.575
Top Component Center:
  lines w0.127: -0.127,0 0.127,0 -0.127,0 ; 0,-0.127 0,0.127 0,-0.127
Top Assembly:
  lines w0.254: -3.5,-3.5 -3.5,2.5 -2.5,3.5 3.5,3.5 3.5,-3.5 -3.5,-3.5
Top Courtyard:
  lines w0.254: -4,-4 -4,4 4,4 4,-4 -4,-4
Top Designator:
  text ".Designator" at -3.465,-0.344 h1.52

## Infineon_MLPQ-48-1EP_7x7mm_P0.5mm_EP5.55x5.55mm [mm] "Infineon_MLPQ-48-1EP_7x7mm_P0.5mm_EP5.55x5.55mm"
pads (113):
  rect 0.65x0.22 smd: 1(-3.425,2.75) 2(-3.425,2.25) 3(-3.425,1.75) 4(-3.425,1.25) 5(-3.425,0.75) 6(-3.425,0.25) 7(-3.425,-0.25) 8(-3.425,-0.75) 9(-3.425,-1.25) 10(-3.425,-1.75) 11(-3.425,-2.25) 12(-3.425,-2.75) 25(3.425,-2.75) 26(3.425,-2.25) 27(3.425,-1.75) 28(3.425,-1.25) 29(3.425,-0.75) 30(3.425,-0.25) 31(3.425,0.25) 32(3.425,0.75) 33(3.425,1.25) 34(3.425,1.75) 35(3.425,2.25) 36(3.425,2.75)
  rect 0.22x0.65 smd: 13(-2.75,-3.425) 14(-2.25,-3.425) 15(-1.75,-3.425) 16(-1.25,-3.425) 17(-0.75,-3.425) 18(-0.25,-3.425) 19(0.25,-3.425) 20(0.75,-3.425) 21(1.25,-3.425) 22(1.75,-3.425) 23(2.25,-3.425) 24(2.75,-3.425) 37(2.75,3.425) 38(2.25,3.425) 39(1.75,3.425) 40(1.25,3.425) 41(0.75,3.425) 42(0.25,3.425) 43(-0.25,3.425) 44(-0.75,3.425) 45(-1.25,3.425) 46(-1.75,3.425) 47(-2.25,3.425) 48(-2.75,3.425)
  rect 5x5 smd: 49(0,0)
  rect 0.55x0.22 on Top Paste: Un1(-3.425,2.75) Un2(-3.425,2.25) Un3(-3.425,1.75) Un4(-3.425,1.25) Un5(-3.425,0.75) Un6(-3.425,0.25) Un7(-3.425,-0.25) Un8(-3.425,-0.75) Un9(-3.425,-1.25) Un10(-3.425,-1.75) Un11(-3.425,-2.25) Un12(-3.425,-2.75) Un53(3.425,2.75) Un54(3.425,2.25) Un55(3.425,1.75) Un56(3.425,1.25) Un57(3.425,0.75) Un58(3.425,0.25) Un59(3.425,-0.25) Un60(3.425,-0.75) Un61(3.425,-1.25) Un62(3.425,-1.75) Un63(3.425,-2.25) Un64(3.425,-2.75)
  rect 0.22x0.55 on Top Paste: Un13(-2.75,3.425) Un14(-2.75,-3.425) Un15(-2.25,3.425) Un16(-2.25,-3.425) Un21(-1.75,3.425) Un22(-1.75,-3.425) Un23(-1.25,3.425) Un24(-1.25,-3.425) Un25(-0.75,3.425) Un26(-0.75,-3.425) Un31(-0.25,3.425) Un32(-0.25,-3.425) Un33(0.25,3.425) Un34(0.25,-3.425) Un39(0.75,3.425) Un40(0.75,-3.425) Un41(1.25,3.425) Un42(1.25,-3.425) Un43(1.75,3.425) Un44(1.75,-3.425) Un49(2.25,3.425) Un50(2.25,-3.425) Un51(2.75,3.425) Un52(2.75,-3.425)
  rect 0.5x0.5 on Top Paste: Un17(-2.175,2.175)
  rect 1.1x1.1 on Top Paste: Un18(-2.175,0.725) Un19(-2.175,-0.725) Un20(-2.175,-2.175) Un27(-0.725,2.175) Un28(-0.725,0.725) Un29(-0.725,-0.725) Un30(-0.725,-2.175) Un35(0.725,2.175) Un36(0.725,0.725) Un37(0.725,-0.725) Un38(0.725,-2.175) Un45(2.175,2.175) Un46(2.175,0.725) Un47(2.175,-0.725) Un48(2.175,-2.175)
F.Cu:
  region: 2.775,-2.775 -2.775,-2.775 -2.775,2.407 -2.407,2.775 2.775,2.775
F.SilkS:
  region: -3.62,3.62 -3.86,3.95 -3.38,3.95
  lines w0.254: -3.61,-3.12 -3.61,-3.61 -3.12,-3.61 ; -3.61,3.12 -3.61,3.38 ; -3.32,3.61 -3.12,3.61 ; 3.12,-3.61 3.61,-3.61 3.61,-3.12 ; 3.12,3.61 3.61,3.61 3.61,3.12
F.Paste:
  region: -1.625,1.625 -2.725,1.625 -2.725,2.386 -2.386,2.725 -1.625,2.725
F.Mask:
  region: 2.775,-2.775 -2.775,-2.775 -2.775,2.407 -2.407,2.775 2.775,2.775
Top Component Center:
  lines w0.127: -0.127,0 0.127,0 -0.127,0 ; 0,-0.127 0,0.127 0,-0.127
Top Assembly:
  lines w0.254: -3.5,-3.5 3.5,-3.5 3.5,3.5 -2.5,3.5 -3.5,2.5 -3.5,-3.5
Top Courtyard:
  lines w0.254: -4,-4 4,-4 4,4 -4,4 -4,-4
Top Designator:
  text ".Designator" at -3.465,-0.344 h1.52

## Infineon_PQFN-22-15-4EP_6x5mm_P0.65mm [mm] "Infineon_PQFN-22-15-4EP_6x5mm_P0.65mm"
pads (56):
  rrect25% 0.85x0.3 smd: 1(-2.873,1.95) 2(-2.873,1.3) 3(-2.873,0.65) 4(-2.873,0) 5(-2.873,-0.65) 6(-2.873,-1.3) 7(-2.873,-1.95)
  rrect25% 0.3x0.85 smd: 8(-1.953,-2.375) 9(-1.302,-2.375) 13(-1.302,2.375) 14(-1.953,2.375)
  rect 0.425x0.5 smd: 10(0.062,-2.55) 10(0.837,-2.55) 10(1.613,-2.55) 10(2.388,-2.55) 12(0.061,2.55) 12(0.835,2.55) 12(1.61,2.55) 12(2.385,2.55)
  rect 2.75x0.55 smd: 10(1.225,-2.025)
  rect 2.95x1.775 smd: 11(1.322,-0.413)
  rect 0.5x0.299 smd: 11(3.047,-1.15) 11(3.047,0.325)
  rect 0.5x0.3 smd: 11(3.047,-0.413)
  rect 2.75x1.375 smd: 12(1.223,1.613)
  rect 1.55x2.7 smd: 15(-1.331,0.05)
  rrect25% 0.8x0.27 on Top Paste: Un1(-2.873,1.95) Un2(-2.873,1.3) Un3(-2.873,0.65) Un4(-2.873,0) Un5(-2.873,-0.65) Un6(-2.873,-1.3) Un7(-2.873,-1.95)
  rrect25% 0.27x0.8 on Top Paste: Un8(-1.953,2.37) Un9(-1.953,-2.37) Un12(-1.302,2.37) Un13(-1.302,-2.37)
  rrect25% 0.7x1.22 on Top Paste: Un10(-1.753,0.795) Un11(-1.753,-0.695) Un14(-0.903,0.795) Un15(-0.903,-0.695)
  rrect25% 0.425x0.625 on Top Paste: Un16(0.061,2.4) Un17(0.062,-2.221) Un20(0.835,2.4) Un21(0.837,-2.221) Un22(1.61,2.4) Un23(1.613,-2.221) Un26(2.385,2.4) Un27(2.388,-2.221)
  rrect25% 1.24x1.78 on Top Paste: Un18(0.467,-0.413) Un24(1.847,-0.413)
  rrect25% 1.25x0.96 on Top Paste: Un19(0.527,1.45) Un25(1.927,1.45)
  rrect25% 0.625x0.29 on Top Paste: Un28(2.907,0.327) Un29(2.907,-0.413) Un30(2.907,-1.152)
F.SilkS:
  region: -3.12,2.46 -3.36,2.79 -2.88,2.79
  lines w0.254: -3.12,-2.37 -3.12,-2.62 -2.39,-2.62 ; -2.67,2.62 -2.37,2.62 ; -0.89,2.62 -0.42,2.62 ; -0.87,-2.62 -0.43,-2.62 ; 2.86,-2.62 3.12,-2.62 3.12,-1.57 ; 2.86,2.62 3.12,2.62 3.12,0.74
Top Component Center:
  lines w0.127: -0.127,0 0.127,0 -0.127,0 ; 0,-0.127 0,0.127 0,-0.127
Top Assembly:
  lines w0.254: -3,-2.5 3,-2.5 3,2.5 -2,2.5 -3,1.5 -3,-2.5
Top Courtyard:
  lines w0.254: -3.55,-3.05 3.55,-3.05 3.55,3.05 -3.55,3.05 -3.55,-3.05
Top Designator:
  text ".Designator" at -3.43,-0.344 h1.52

## Infineon_PQFN-44-31-5EP_7x7mm_P0.5mm [mm] "Infineon_PQFN-44-31-5EP_7x7mm_P0.5mm"
pads (125):
  rect 0.7x0.25 smd: 1(-3.447,2.75) 2(-3.447,2.25) 3(-3.447,1.75) 4(-3.447,1.25) 5(-3.447,0.75) 6(-3.447,0.25) 7(-3.447,-0.25) 8(-3.447,-0.75) 9(-3.447,-1.25) 10(-3.447,-1.75) 11(-3.447,-2.25) 12(-3.447,-2.75)
  rect 0.25x0.7 smd: 13(-2.746,-3.45) 14(-2.247,-3.45) 16(-1.246,-3.45) 17(-0.747,-3.45) 26(-0.747,3.45) 27(-1.246,3.45) 29(-2.247,3.45) 30(-2.746,3.45)
  rect 0.25x0.645 smd: 19(0.754,-3.477) 19(1.254,-3.477) 19(1.753,-3.477) 19(2.254,-3.477) 19(2.753,-3.477) 24(0.754,3.477) 24(1.254,3.477) 24(1.753,3.477) 24(2.254,3.477) 24(2.753,3.477)
  rect 2.72x1.27 smd: 19(1.783,-2.52) 20(1.383,-0.84) 23(1.383,0.84) 24(1.786,2.52)
  rect 0.65x0.25 smd: 19(3.468,-2.75) 19(3.468,-2.25) 24(3.471,2.25) 24(3.471,2.75)
  rect 0.25x0.75 smd: 20(-0.246,-3.425) 23(-0.246,3.425)
  rect 0.25x1.98 smd: 20(-0.026,-2.26) 23(-0.026,2.26)
  rect 1.05x0.35 smd: 20(3.268,-1.3) 23(3.268,1.3)
  rect 0.2x0.75 smd: 21(3.143,-0.5) 22(3.143,0.5)
  rect 0.55x0.25 smd: 21(3.518,-0.75) 21(3.518,-0.25) 22(3.518,0.25) 22(3.518,0.75)
  rect 0.283x0.283 smd rot 45: 31(-2.546,2.29)
  rect 0.25x1.31 smd: 31(-1.746,-3.145) 31(-1.746,3.145)
  rect 2.16x4.78 smd: 31(-1.666,-0.1)
  rect 1.96x0.2 smd: 31(-1.566,2.39)
  rect 0.39x0.22 on Top Paste: Un1(-3.321,2.75) Un2(-3.321,2.25) Un3(-3.321,1.75) Un4(-3.321,1.25) Un5(-3.321,0.75) Un6(-3.321,0.25) Un7(-3.321,-0.25) Un8(-3.321,-0.75) Un9(-3.321,-1.25) Un10(-3.321,-1.75) Un11(-3.321,-2.25) Un12(-3.321,-2.75)
  rect 0.22x0.39 on Top Paste: Un13(-2.746,3.325) Un14(-2.746,-3.325) Un15(-2.247,3.325) Un16(-2.247,-3.325) Un23(-1.246,3.325) Un24(-1.246,-3.325) Un29(-0.747,3.325) Un30(-0.747,-3.325)
  rect 0.77x0.93 on Top Solder: Un17(-2.207,1.76) Un18(-2.207,0.52) Un19(-2.207,-0.72) Un20(-2.207,-1.96) Un25(-1.127,1.76) Un26(-1.127,0.52) Un27(-1.127,-0.72) Un28(-1.127,-1.96)
  rect 0.23x1.01 on Top Paste: Un21(-1.746,3.015) Un22(-1.746,-3.015)
  rect 0.23x0.44 on Top Paste: Un31(-0.246,3.28) Un32(-0.246,-3.28)
  rect 0.21x0.34 on Top Paste: Un33(-0.026,3.07) Un34(-0.026,2.37) Un35(-0.026,1.67) Un36(-0.026,-1.67) Un37(-0.026,-2.37) Un38(-0.026,-3.07)
  rect 0.68x0.9 on Top Solder: Un39(0.473,0.84) Un40(0.473,-0.84) Un47(1.383,0.84) Un48(1.383,-0.84) Un55(2.294,0.84) Un56(2.294,-0.84)
  rect 0.22x0.35 on Top Solder: Un41(0.754,3.325) Un42(0.754,-3.325) Un45(1.254,3.325) Un46(1.254,-3.325) Un49(1.753,3.325) Un50(1.753,-3.325) Un53(2.254,3.325) Un54(2.254,-3.325) Un59(2.753,3.325) Un60(2.753,-3.325)
  rect 0.65x0.9 on Top Solder: Un43(0.877,2.515) Un44(0.877,-2.515) Un51(1.786,2.515) Un52(1.786,-2.515) Un57(2.696,2.515) Un58(2.696,-2.515)
  rect 0.68x0.22 on Top Solder: Un61(3.163,1.3) Un62(3.163,-1.3)
  rect 0.44x0.22 on Top Solder: Un63(3.284,0.75) Un64(3.284,0.25) Un65(3.284,-0.25) Un66(3.284,-0.75)
  rect 0.28x0.22 on Top Solder: Un67(3.364,2.75) Un68(3.364,2.25) Un69(3.364,-2.25) Un70(3.364,-2.75)
F.SilkS:
  region: -3.62,3.62 -3.86,3.95 -3.38,3.95
  lines w0.254: -3.61,-3.14 -3.61,-3.61 -3.14,-3.61 ; -3.61,3.14 -3.61,3.38 ; -3.32,3.61 -3.13,3.61 ; 0.14,-3.61 0.37,-3.61 ; 0.14,3.61 0.37,3.61 ; 3.14,-3.605 3.61,-3.605 3.61,-3.135 ; 3.14,3.605 3.61,3.605 3.61,3.135 ; 3.61,-1.86 3.61,-1.74 ; 3.61,1.74 3.61,1.86
Top Component Center:
  lines w0.127: -0.127,0 0.127,0 -0.127,0 ; 0,-0.127 0,0.127 0,-0.127
Top Assembly:
  lines w0.254: -3.5,-3.5 -3.5,2.5 -2.5,3.5 3.5,3.5 3.5,-3.5 -3.5,-3.5
Top Courtyard:
  lines w0.254: -4.05,-4.05 -4.05,4.05 4.05,4.05 4.05,-4.05 -4.05,-4.05
Top Designator:
  text ".Designator" at -3.43,-0.344 h1.52

## Linear_DE14MA [mm] "Linear_DE14MA"
pads (14):
  rect 0.7x0.25 smd: 1(-1.4,1.5) 2(-1.4,1) 3(-1.4,0.5) 5(-1.4,-0.5) 6(-1.4,-1) 7(-1.4,-1.5) 8(1.4,-1.5) 10(1.4,-0.5) 11(1.4,0) 12(1.4,0.5) 13(1.4,1) 14(1.4,1.5)
  rect 1.65x1.28 smd: 4(0,0.79)
  rect 1.15x1.07 smd: 9(0,-1.145)
F.Cu:
  circle w0: c0.575,1.43 r0.25
  circle w0: c0.575,0.15 r0.25
  circle w0: c-0.575,-0.86 r0.25
  circle w0: c0.575,-0.86 r0.25
  circle w0: c-0.575,-1.43 r0.25
  circle w0: c0.575,-1.43 r0.25
  region: 0.575,-0.1 -0.825,-0.1 -0.825,1.43 -0.575,1.68 0.575,1.68
  region: -0.78,-0.1 -0.88,-0.125 -1.75,-0.125 -1.75,0.125 -0.78,0.125
  region: -0.825,0.125 -1.075,0.125 -1.025,0.13 -0.977,0.145 -0.935,0.168 -0.897,0.199 -0.866,0.238 -0.844,0.279 -0.83,0.326 -0.825,0.375
  region: 0.825,-1.43 -0.825,-1.43 -0.825,-0.86 0.825,-0.86
  region: 1.75,-1.125 0.825,-1.125 0.825,-0.875 1.75,-0.875
F.SilkS:
  region: -1.94,1.82 -2.42,1.82 -1.94,2.3
  lines w0.254: -1.5,-2.11 1.5,-2.11 ; -1.5,2.11 1.5,2.11
F.Paste:
  circle w0: c0.575,1.43 r0.25
  circle w0: c0.575,0.15 r0.25
  circle w0: c-0.575,-0.86 r0.25
  circle w0: c0.575,-0.86 r0.25
  circle w0: c-0.575,-1.43 r0.25
  circle w0: c0.575,-1.43 r0.25
  region: 0.575,-0.1 -0.825,-0.1 -0.825,1.43 -0.575,1.68 0.575,1.68
  region: -0.78,-0.1 -0.88,-0.125 -1.75,-0.125 -1.75,0.125 -0.78,0.125
  region: -0.825,0.125 -1.075,0.125 -1.025,0.13 -0.977,0.145 -0.935,0.168 -0.897,0.199 -0.866,0.238 -0.844,0.279 -0.83,0.326 -0.825,0.375
  region: 0.825,-1.43 -0.825,-1.43 -0.825,-0.86 0.825,-0.86
  region: 1.75,-1.125 0.825,-1.125 0.825,-0.875 1.75,-0.875
F.Mask:
  circle w0: c0.575,1.43 r0.25
  circle w0: c0.575,0.15 r0.25
  circle w0: c-0.575,-0.86 r0.25
  circle w0: c0.575,-0.86 r0.25
  circle w0: c-0.575,-1.43 r0.25
  circle w0: c0.575,-1.43 r0.25
  region: 0.575,-0.1 -0.825,-0.1 -0.825,1.43 -0.575,1.68 0.575,1.68
  region: -0.78,-0.1 -0.88,-0.125 -1.75,-0.125 -1.75,0.125 -0.78,0.125
  region: -0.825,0.125 -1.075,0.125 -1.025,0.13 -0.977,0.145 -0.935,0.168 -0.897,0.199 -0.866,0.238 -0.844,0.279 -0.83,0.326 -0.825,0.375
  region: 0.825,-1.43 -0.825,-1.43 -0.825,-0.86 0.825,-0.86
  region: 1.75,-1.125 0.825,-1.125 0.825,-0.875 1.75,-0.875
Top Component Center:
  lines w0.127: -0.127,0 0.127,0 -0.127,0 ; 0,-0.127 0,0.127 0,-0.127
Top Assembly:
  lines w0.254: -1.5,-2 -1.5,1 -0.5,2 1.5,2 1.5,-2 -1.5,-2
Top Courtyard:
  lines w0.254: -2,-2.25 -2,2.25 2,2.25 2,-2.25 -2,-2.25
Top Designator:
  text ".Designator" at -3.43,-0.344 h1.52

## Linear_UGK52_QFN-46-52 [mm] "Linear_UGK52_QFN-46-52"
pads (62):
  rect 0.7x0.25 smd: 1(-3.4,3.25) 2(-3.4,2.75) 4(-3.4,1.75) 5(-3.4,1.25) 6(-3.4,0.75) 7(-3.4,0.25) 8(-3.4,-0.25) 9(-3.4,-0.75) 10(-3.4,-1.25) 11(-3.4,-1.75) 12(-3.4,-2.25) 13(-3.4,-2.75) 14(-3.4,-3.25) 27(3.4,-3.25) 28(3.4,-2.75) 29(3.4,-2.25) 30(3.4,-1.75) 31(3.4,-1.25) 32(3.4,-0.75) 33(3.4,-0.25) 34(3.4,0.25) 35(3.4,0.75) 36(3.4,1.25) 38(3.4,2.25) 39(3.4,2.75) 40(3.4,3.25)
  rect 0.25x0.7 smd: 15(-2.75,-3.9) 16(-2.25,-3.9) 17(-1.75,-3.9) 18(-1.25,-3.9) 19(-0.75,-3.9) 20(-0.25,-3.9) 21(0.25,-3.9) 22(0.75,-3.9) 23(1.25,-3.9) 24(1.75,-3.9) 25(2.25,-3.9) 26(2.75,-3.9) 42(2.25,3.9) 43(1.75,3.9) 44(1.25,3.9) 46(0.25,3.9) 47(-0.25,3.9) 48(-0.75,3.9) 50(-1.75,3.9) 52(-2.75,3.9)
  rect 1.352x1.613 smd: 53(-2.029,-2.419) 53(-2.029,-0.806) 53(-2.029,0.806) 53(-2.029,2.419) 53(-0.676,-2.419) 53(-0.676,-0.806) 53(-0.676,0.806) 53(-0.676,2.419) 53(0.676,-2.419) 53(0.676,-0.806) 53(0.676,0.806) 53(0.676,2.419) 53(2.029,-2.419) 53(2.029,-0.806) 53(2.029,0.806) 53(2.029,2.419)
F.SilkS:
  region: -3.625,4.125 -3.865,4.455 -3.385,4.455
  lines w0.254: -3.615,3.645 -3.615,3.885 ; -3.61,-3.64 -3.61,-4.11 -3.14,-4.11 ; -3.325,4.115 -3.135,4.115 ; 2.64,4.11 3.61,4.11 3.61,3.64 ; 3.14,-4.11 3.61,-4.11 3.61,-3.64
Top Component Center:
  lines w0.127: -0.127,0 0.127,0 -0.127,0 ; 0,-0.127 0,0.127 0,-0.127
Top Assembly:
  lines w0.254: -3.5,-4 -3.5,3 -2.5,4 3.5,4 3.5,-4 -3.5,-4
Top Courtyard:
  lines w0.254: -4,-4.5 -4,4.5 4,4.5 4,-4.5 -4,-4.5
Top Designator:
  text ".Designator" at -3.43,-0.344 h1.52

## LQFN-10-1EP_2x2mm_P0.5mm_EP0.7x0.7mm [mm] "LQFN-10-1EP_2x2mm_P0.5mm_EP0.7x0.7mm"
pads (12):
  rrect25% 0.825x0.25 smd: 1(-0.962,0.25) 2(-0.962,-0.25) 6(0.962,-0.25) 7(0.962,0.25)
  rrect25% 0.25x0.825 smd: 3(-0.5,-0.962) 4(0,-0.962) 5(0.5,-0.962) 8(0.5,0.962) 9(0,0.962) 10(-0.5,0.962)
  rect 0.7x0.7 smd: 11(0,0)
  rrect25% 0.56x0.56 on Top Paste: Un1(0,0)
F.SilkS:
  region: -1.13,1.12 -1.37,1.45 -0.89,1.45
  lines w0.254: -1.13,0.635 -1.13,0.88 ; -1.11,-0.635 -1.11,-1.11 -0.885,-1.11 ; 0.885,-1.11 1.11,-1.11 1.11,-0.635 ; 0.885,1.11 1.11,1.11 1.11,0.635
Top Component Center:
  lines w0.127: -0.127,0 0.127,0 -0.127,0 ; 0,-0.127 0,0.127 0,-0.127
Top Assembly:
  region: 1,-1 -1,-1 -1,0.5 -0.5,1 1,1
Top Courtyard:
  lines w0.254: -1.63,-0.63 -1.25,-0.63 -1.25,-1.25 -0.88,-1.25 -0.88,-1.63 0.88,-1.63 0.88,-1.25 1.25,-1.25 1.25,-0.63 1.63,-0.63 1.63,0.63 1.25,0.63 1.25,1.25 0.88,1.25 0.88,1.63 -0.88,1.63 -0.88,1.25 -1.25,1.25 -1.25,0.63 -1.63,0.63 -1.63,-0.63
Top Designator:
  text ".Designator" at -2.251,-0.226 h1